# Altium schematic symbol library Passives.SchLib: 3 symbols
Pins are listed as number, name and electrical type; pins without a type are passive.

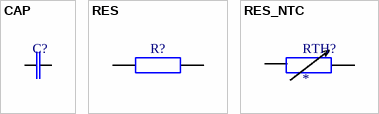
[diagram p0: symbols CAP to RES_NTC]

## CAP
designator C?
pins: 0, 1 0

## RES
designator R?
pins: 0, 1 0

## RES_NTC
designator RTH?
pins: 0, 1 0